# Altium footprint library 2019-09-14_06-02-46.PcbLib: 1 footprints
Each footprint in its own frame and in the unit in brackets; x right, y up, seen from the top. Pads: shape width x height; smd on the part's side, far side on the other; paste and mask are expansions set on the pad; w line width, h text height; cw(c..) or ccw(c..) is an arc to the next point about the centre after c.
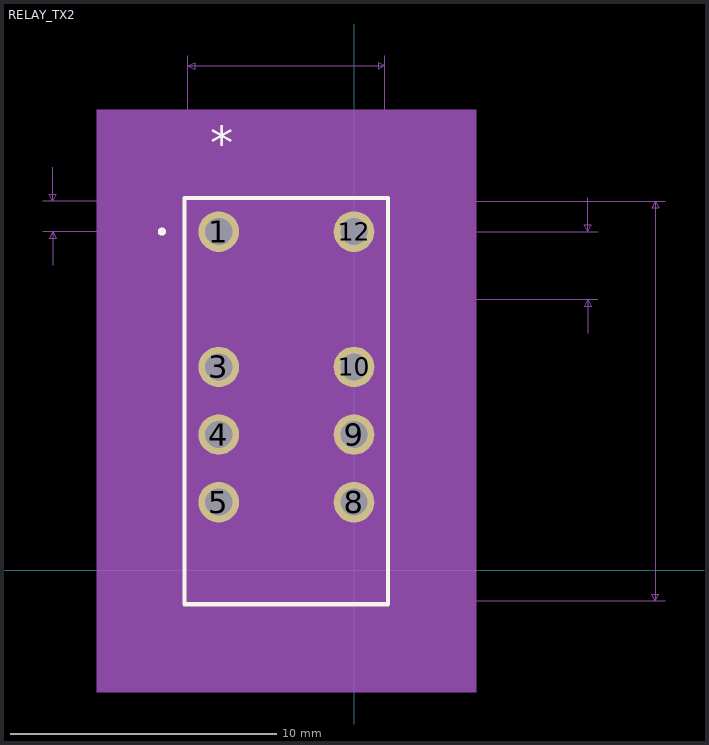
[diagram p0: the footprint, top view; thin cyan lines are the x and y axes]

## RELAY_TX2 [mil]
pads (8):
  round 60 hole 40 mask+0: 1(-200,501) 3(-200,301) 4(-200,201) 5(-200,101) 8(0,101) 9(0,201) 10(0,301) 12(0,501)
Top Overlay:
  circle w6: c-284,501 r3
  lines w6: -250.5,-50 50.5,-50 50.5,551 -250.5,551 -250.5,-50
  text "*" at -212.5,607.67 h50
Mechanical 5:
  region: 180.5,-180 -380.5,-180 -380.5,681 180.5,681
Mechanical 7:
  lines w1: -460.5,501 45.5,501 ; -460.5,546 -100,546 460.5,546 ; -445.5,451 -445.5,501 ; -445.5,596 -445.5,546 ; -245.5,250.5 -245.5,761 ; -200,250.5 -200,661 ; -100,501 360.5,501 ; 0,250.5 0,661 ; 45.5,-45 460.5,-45 ; 45.5,250.5 45.5,761 ; 45.5,401 360.5,401 ; 345.5,351 345.5,401 ; 345.5,551 345.5,501 ; -445.5,501 -450.5,491 -440.5,491 -445.5,501 ; -445.5,546 -450.5,556 -440.5,556 -445.5,546 ; -245.5,746 45.5,746 ; -245.5,746 -235.5,751 -235.5,741 -245.5,746 ; -200,646 0,646 ; -200,646 -190,651 -190,641 -200,646 ; 0,646 -10,651 -10,641 0,646 ; 45.5,746 35.5,751 35.5,741 45.5,746 ; 345.5,401 340.5,391 350.5,391 345.5,401 ; 345.5,501 340.5,511 350.5,511 345.5,501 ; 445.5,-45 445.5,546 ; 445.5,-45 440.5,-35 450.5,-35 445.5,-45 ; 445.5,546 440.5,536 450.5,536 445.5,546
  text "Default Padstyle: EX60Y60D40P" at -462.5,-245 h50
  text "Alt 1 Padstyle: OX60Y90D30P" at -437.5,-305 h50
  text "Alt 2 Padstyle: OX90Y60D30P" at -437.5,-365 h50
  text "0.291in/7.391mm" at -193.75,766 h25
  text "0.2in/5.08mm" at -175,666 h25
  text "0.045in/1.143mm" at -653,511 h25
  text "0.1in/2.54mm" at 365.5,438.5 h25
  text "0.591in/15.011mm" at 465.5,238 h25
Mechanical 13:
  circle w0: c-170,501 r3
  lines w0: -112,546 ccw(c-100,546) -88,546
  lines w1: -245.5,-45 45.5,-45 45.5,546 -245.5,546 -245.5,-45
  text "*" at -212.5,517.67 h50
Mechanical 15:
  region: 55.5,-55 -255.5,-55 -255.5,556 55.5,556
  region: 45.5,-45 -245.5,-45 -245.5,546 45.5,546
  lines w6: -255.5,-55 -255.5,556 55.5,556 55.5,-55 -255.5,-55
3D body: height 10, standoff 0, extent 0,0 10,10